# EAGLE library part TFT_3.5"_SPI_480X320 (library TFT SPI 3.5inch 480x320 ILI9488)
TFT 3.5" SPI 480X320 NOT CONFIRMED DATASHEET: http://www.lcdwiki.com/3.5inch_SPI_Module_ILI9488_SKU:MSP3520
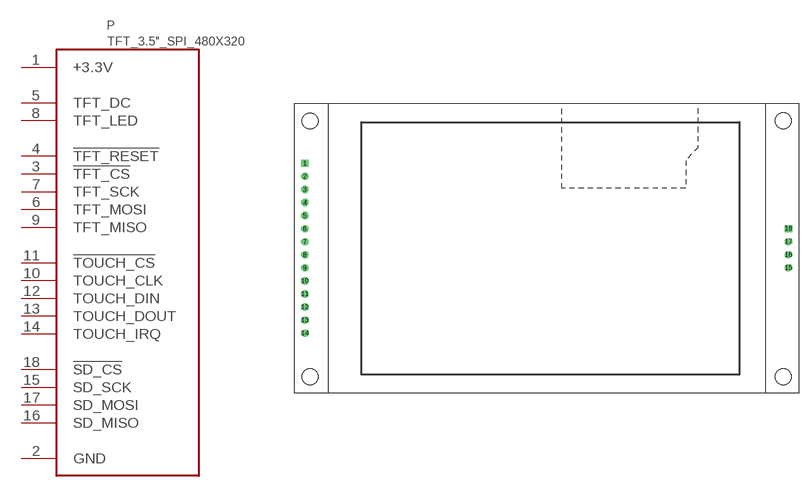
[diagram p0: symbol with the pads of TFT_3.5"_SPI_480X320; footprint TFT_3.5"_SPI_480X320]

Designator prefix P

## TFT_3.5"_SPI_480X320  [TFT_3.5"_SPI_480X320]
1  +3.3V  pwr
2  GND  pwr
3  !TFT_CS!  in
4  !TFT_RESET!  in
5  TFT_DC  pwr
6  TFT_MOSI  in
7  TFT_SCK  in
8  TFT_LED  pas
9  TFT_MISO  out
10  TOUCH_CLK  in
11  !TOUCH_CS!  in
12  TOUCH_DIN  in
13  TOUCH_DOUT  out
14  TOUCH_IRQ  out
15  SD_SCK  in
16  SD_MISO  out
17  SD_MOSI  in
18  !SD_CS!  in

## Footprint TFT_3.5"_SPI_480X320 (pad centres in mm)
drill 0.9 square: 1 -48.8,17.55; 18 45.2,4.85
drill 0.9 octagon: 2 -48.8,15.01; 3 -48.8,12.47; 4 -48.8,9.93; 5 -48.8,7.39; 6 -48.8,4.85; 7 -48.8,2.31; 8 -48.8,-0.23; 9 -48.8,-2.77; 10 -48.8,-5.31; 11 -48.8,-7.85; 12 -48.8,-10.39; 13 -48.8,-12.93; 14 -48.8,-15.47; 15 45.2,-2.77; 16 45.2,-0.23; 17 45.2,2.31
hole 3.1 at -47.8,25.76
hole 3.1 at 44.2,25.79
hole 3.1 at 44.2,-23.89
hole 3.1 at -47.8,-23.89